# Altium footprint library Crystal_Osilator$.PcbLib: 54 footprints (part 3 of 4)
Each footprint in its own frame and in the unit in brackets; x right, y up, seen from the top. Pads: shape width x height; smd on the part's side, far side on the other; paste and mask are expansions set on the pad; w line width, h text height; cw(c..) or ccw(c..) is an arc to the next point about the centre after c.
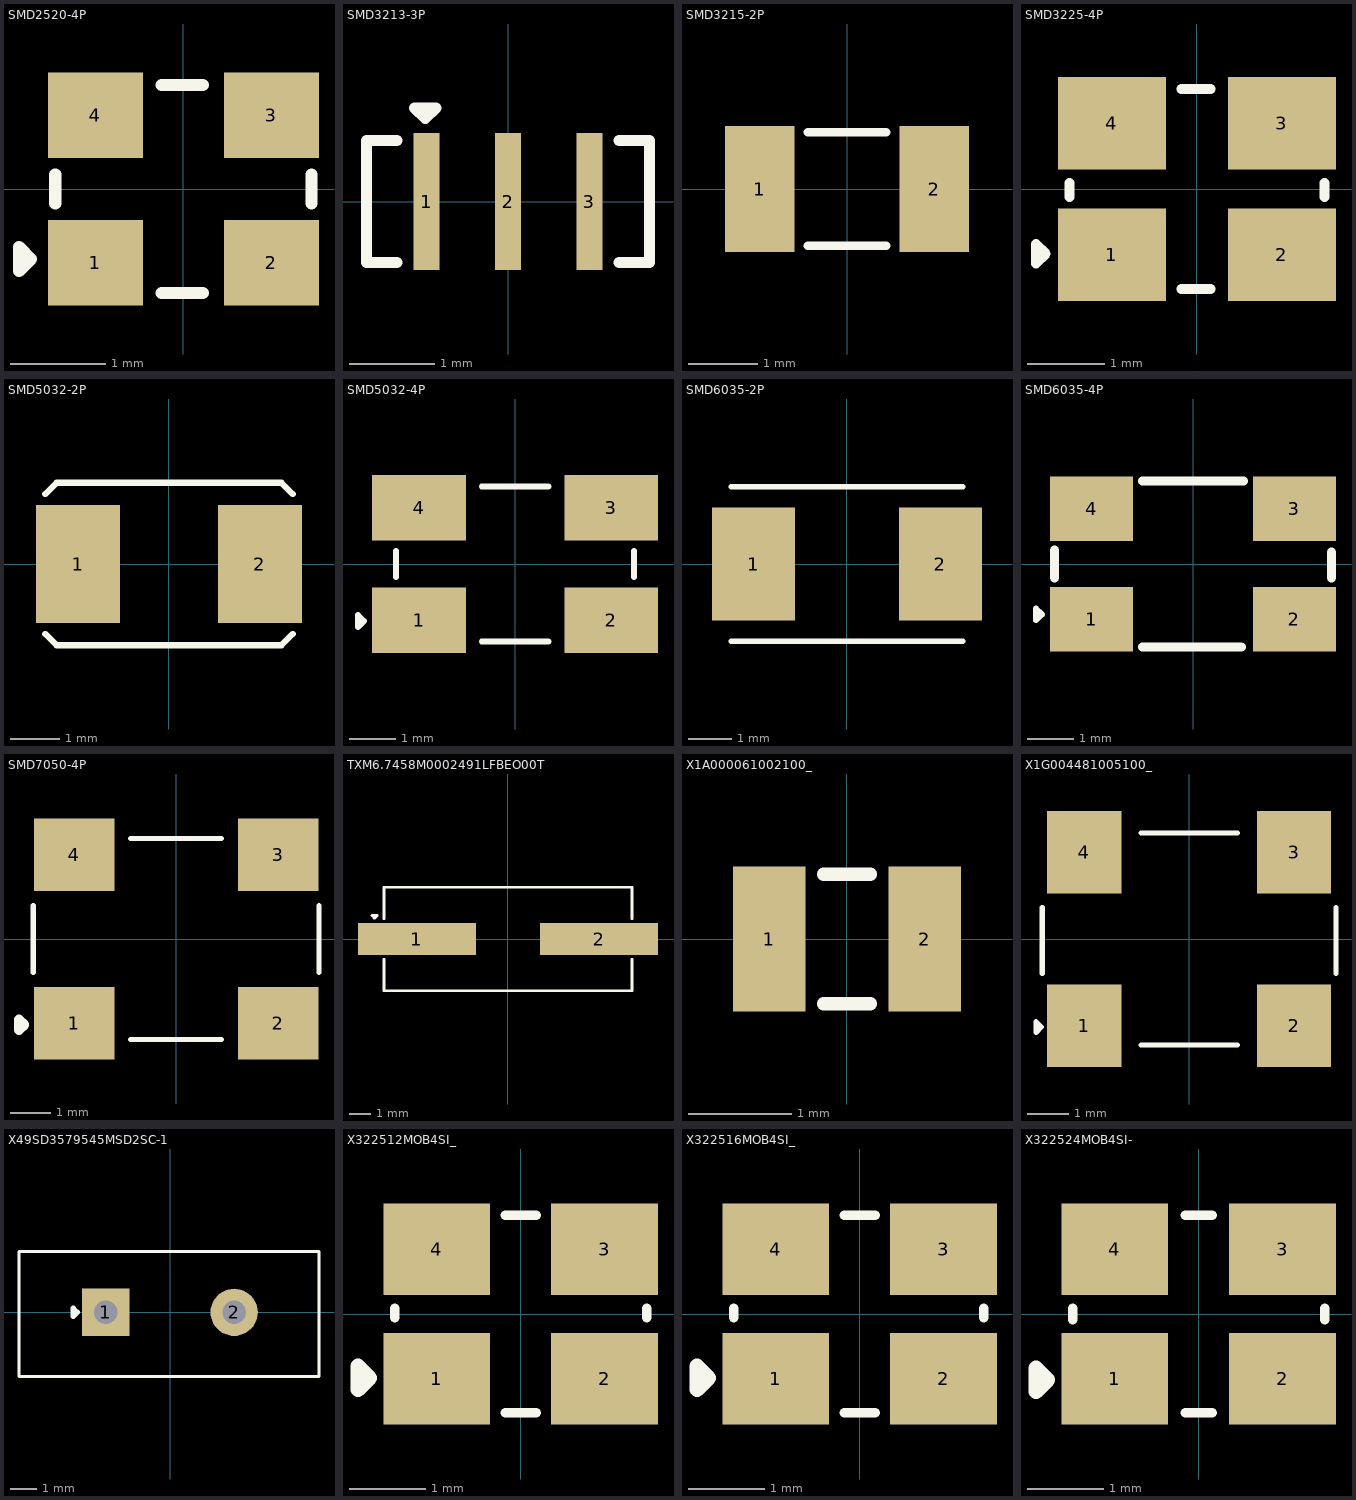
[diagram p2: the footprints below, top view; thin cyan lines are the x and y axes]

## SMD2520-4P [mm]
pads (4):
  rect 1x0.9 smd: 1(-0.925,-0.775) 2(0.925,-0.775) 3(0.925,0.775) 4(-0.925,0.775)
Top Overlay:
  lines w0.127: -1.346,-0.152 -1.346,0.152 ; -0.229,-1.092 0.203,-1.092 ; -0.229,1.092 0.203,1.092 ; 1.346,-0.152 1.346,0.152 ; -1.727,-0.864 -1.6,-0.737 -1.727,-0.61 -1.727,-0.864
3D body "User Library-Crystal NDK NX2520SA series.step": height 0.55, standoff 0, extent -1.3,-1.05 1.3,1.05

## SMD3213-3P [mm]
pads (3):
  rect 0.3x1.6 smd: 1(-0.95,0) 2(0,0) 3(0.95,0)
Top Overlay:
  lines w0.127: -1.295,-0.711 -1.651,-0.711 -1.651,0.711 -1.295,0.711 ; 1.295,-0.711 1.651,-0.711 1.651,0.711 1.295,0.711 ; -1.092,1.092 -0.965,0.965 -0.838,1.092 -1.092,1.092
3D body "CSTCE16M0V53-R0.STEP": height 1, standoff 0, extent -1.6,-0.65 1.6,0.65

## SMD3215-2P [mm]
pads (2):
  rect 1x1.8 smd: 1(-1.25,0) 2(1.25,0)
Top Overlay:
  lines w0.127: -0.559,-0.813 0.559,-0.813 ; -0.559,0.813 0.559,0.813
3D body "User Library-NDK_NX3215SA.step": height 0.8, standoff 0, extent -1.6,-0.75 1.6,0.75

## SMD3225-4P [mm]
pads (4):
  rect 1.4x1.2 smd: 1(-1.1,-0.85) 2(1.1,-0.85) 3(1.1,0.85) 4(-1.1,0.85)
Top Overlay:
  lines w0.127: -1.651,-0.102 -1.651,0.076 ; -0.203,-1.295 0.178,-1.295 ; -0.203,1.295 0.178,1.295 ; 1.651,-0.102 1.651,0.076 ; -2.083,-0.965 -1.956,-0.838 -2.083,-0.711 -2.083,-0.965
3D body "User Library-User Library-Siward_SX3225.step": height 0.81, standoff 0, extent -1.6,-1.25 1.6,1.25

## SMD5032-2P [mm]
pads (2):
  rect 1.7x2.4 smd: 1(-1.85,0) 2(1.85,0)
Top Overlay:
  lines w0.127: -2.515,-1.422 -2.286,-1.651 2.286,-1.651 2.515,-1.422 ; -2.515,1.422 -2.286,1.651 2.286,1.651 2.515,1.422
3D body "User Library-ABM3-1.STEP": height 1.3, standoff 0, extent -2.5,-1.6 2.5,1.6

## SMD5032-4P [mm]
pads (4):
  rect 2x1.4 smd: 1(-2.05,-1.2) 2(2.05,-1.2) 3(2.05,1.2) 4(-2.05,1.2)
Top Overlay:
  lines w0.127: -2.54,-0.279 -2.54,0.279 ; -0.711,-1.651 0.711,-1.651 ; -0.711,1.651 0.711,1.651 ; 2.54,-0.279 2.54,0.279 ; -3.353,-1.346 -3.353,-1.092 -3.226,-1.219 -3.353,-1.346
3D body "C112587.step": height 1.12, standoff 0, extent -2.5,-1.601 2.5,1.6

## SMD6035-2P [mm]
pads (2):
  rect 1.9x2.6 smd: 1(-2.15,0) 2(2.15,0)
Top Overlay:
  lines w0.127: -2.667,-1.778 2.667,-1.778 ; -2.667,1.778 2.667,1.778
3D body "ABM7-32.000MHZ-D2Y-T.STEP": height 1.47, standoff -0.03, extent -3,-1.752 3,1.748

## SMD6035-4P [mm]
pads (4):
  rect 1.8x1.4 smd: 1(-2.2,-1.2) 2(2.2,-1.2) 3(2.2,1.2) 4(-2.2,1.2)
Top Overlay:
  lines w0.127: -3.404,-1.219 -3.277,-1.092 -3.404,-0.965 -3.404,-1.219
  lines w0.2: -3,-0.296 -3,0.296 ; -1.096,-1.8 1.045,-1.8 ; -1.096,1.8 1.096,1.8 ; 3,-0.296 3,0.254
3D body "ABMM2-8.000MHZ-E2-T.step": height 1.2, standoff 0, extent -3,-1.8 3,1.8

## SMD7050-4P [mm]
pads (4):
  rect 2x1.8 smd: 1(-2.54,-2.1) 2(2.54,-2.1) 3(2.54,2.1) 4(-2.54,2.1)
Top Overlay:
  lines w0.127: -3.556,-0.838 -3.556,0.838 ; -1.132,-2.5 0,-2.5 1.132,-2.5 ; -1.132,2.5 0,2.5 1.132,2.5 ; 3.556,-0.838 3.556,0.838
  lines w0.254: -3.912,-2.261 -3.785,-2.134 -3.912,-2.007 -3.912,-2.261
3D body "7050.STEP": height 1.5, standoff 0, extent -3.5,-2.522 3.5,2.478

## TXM6.7458M0002491LFBEO00T [mm]
pads (2):
  rect 5.5x1.5 smd: 1(-4.25,0) 2(4.25,0)
Top Overlay:
  lines w0.127: -5.79,-0.94 -5.79,-2.415 5.789,-2.415 ; -5.79,0.94 -5.79,2.415 5.789,2.415 ; 5.79,-2.415 5.79,-0.94 ; 5.79,0.94 5.79,2.415 ; -6.35,1.092 -6.096,1.092 -6.223,0.965 -6.35,1.092
3D body "User Library-Crystal HC49_US-SM.STEP": height 4.3, standoff 0, extent -6.4,-2.415 6.4,2.415

## X1A000061002100_ [mm]
pads (2):
  rect 0.7x1.4 smd: 1(-0.75,0) 2(0.75,0)
Top Overlay:
  lines w0.127: -0.229,-0.625 0,-0.625 0.229,-0.625 ; -0.229,0.625 0,0.625 0.229,0.625
3D body "User Library-ABS06-1.step": height 0.6, standoff 0, extent -1,-0.6 1,0.6

## X1G004481005100_ [mm]
pads (4):
  rect 1.8x2 smd: 1(-2.54,-2.1) 2(2.54,-2.1) 3(2.54,2.1) 4(-2.54,2.1)
Top Overlay:
  lines w0.127: -3.556,-0.838 -3.556,0.762 ; -1.168,-2.565 1.168,-2.565 ; -1.168,2.565 1.168,2.565 ; 3.556,-0.838 3.556,0.762 ; -3.708,-2.261 -3.708,-2.007 -3.581,-2.134 -3.708,-2.261
3D body "User Library-SG_7050_EPSON.step": height 1.4, standoff 0, extent -3.5,-2.5 3.5,2.5

## X49SD3579545MSD2SC-1 [mm]
pads (2):
  rect 1.8x1.8 hole 0.9: 1(-2.44,0)
  round 1.8 hole 0.9: 2(2.44,0)
Top Overlay:
  lines w0.127: -5.74,-2.438 -5.74,2.311 5.664,2.311 5.664,-2.438 -5.74,-2.438
  lines w0.2: -3.683,-0.152 -3.531,0 -3.683,0.152 -3.683,-0.152
3D body "User Library-HP49US.step": height 3.5, standoff -4, extent -5.7,-2.388 5.65,2.262

## X322512MOB4SI_ [mm]
pads (4):
  rect 1.4x1.2 smd: 1(-1.1,-0.85) 2(1.1,-0.85) 3(1.1,0.85) 4(-1.1,0.85)
Top Overlay:
  lines w0.127: -1.651,-0.051 -1.651,0.076 ; -0.203,-1.295 0.203,-1.295 ; -0.203,1.295 0.203,1.295 ; 1.651,-0.051 1.651,0.076
  lines w0.2: -2.134,-0.991 -1.981,-0.838 -2.134,-0.686 -2.134,-0.991
3D body "ABM8G.STEP": height 0.99, standoff 0, extent -1.6,-1.245 1.6,1.245

## X322516MOB4SI_ [mm] "16MHz SMD Crystal Resonator 12pF"
pads (4):
  rect 1.4x1.2 smd: 1(-1.1,-0.85) 2(1.1,-0.85) 3(1.1,0.85) 4(-1.1,0.85)
Top Overlay:
  lines w0.127: -1.651,-0.051 -1.651,0.076 ; -0.203,-1.295 0.203,-1.295 ; -0.203,1.295 0.203,1.295 ; 1.626,-0.051 1.626,0.076
  lines w0.2: -2.134,-0.991 -2.134,-0.686 -1.981,-0.838 -2.134,-0.991
3D body "User Library-Crystal_ECX-32.STEP": height 0.82, standoff 0, extent -1.6,-1.25 1.6,1.25

## X322524MOB4SI- [mm]
pads (4):
  rect 1.4x1.2 smd: 1(-1.1,-0.85) 2(1.1,-0.85) 3(1.1,0.85) 4(-1.1,0.85)
Top Overlay:
  lines w0.127: -1.651,-0.076 -1.651,0.076 ; -0.178,-1.295 0.178,-1.295 ; -0.178,1.295 0.178,1.295 ; 1.651,-0.076 1.651,0.076
  lines w0.2: -2.134,-1.016 -1.981,-0.864 -2.134,-0.711 -2.134,-1.016
3D body "ABM8-24.000MHZ-R60-D-1-W-T.STEP": height 0.8, standoff 0, extent -1.6,-1.25 1.6,1.25